# Altium footprint library SC753808UTG.PcbLib: 1 footprints
Each footprint in its own frame and in the unit in brackets; x right, y up, seen from the top. Pads: shape width x height; smd on the part's side, far side on the other; paste and mask are expansions set on the pad; w line width, h text height; cw(c..) or ccw(c..) is an arc to the next point about the centre after c.
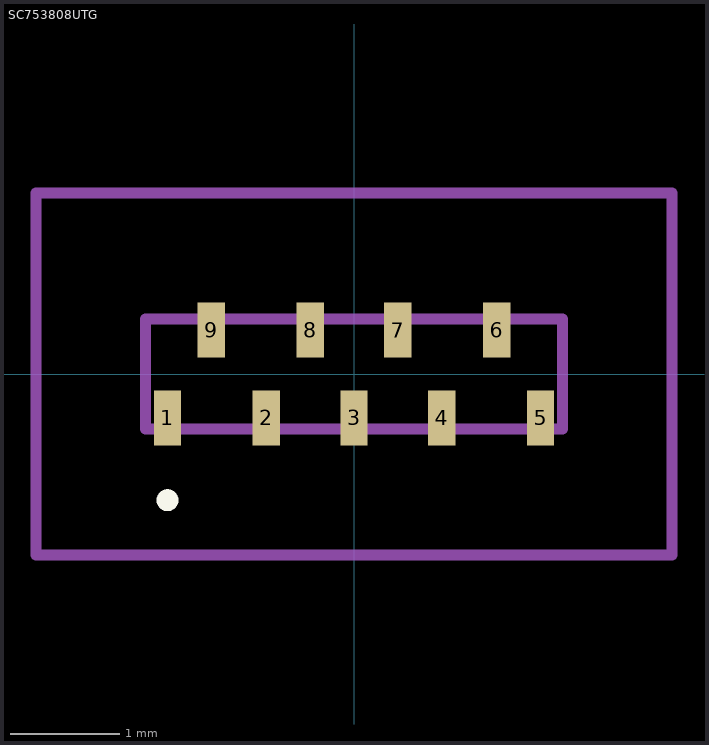
[diagram p0: the footprint, top view; thin cyan lines are the x and y axes]

## SC753808UTG [mm]
pads (9):
  rect 0.25x0.5 smd: 1(-1.7,-0.4) 2(-0.8,-0.4) 3(0,-0.4) 4(0.8,-0.4) 5(1.7,-0.4) 6(1.3,0.4) 7(0.4,0.4) 8(-0.4,0.4) 9(-1.3,0.4)
Top Overlay:
  lines w0.1: -1.7,-1.2 -1.7,-1.2 ; -1.7,-1.2 ccw(c-1.7,-1.15) -1.7,-1.1 ; -1.7,-1.2 cw(c-1.7,-1.15) -1.7,-1.1 ; -1.7,-1.1 -1.7,-1.1
Mechanical 15:
  lines w0.1: -1.9,-0.5 1.9,-0.5 1.9,0.5 -1.9,0.5 -1.9,-0.5
Mechanical 20:
  lines w0.1: -2.9,-1.65 2.9,-1.65 2.9,1.65 -2.9,1.65 -2.9,-1.65